# Altium footprint library SamacSys.PcbLib: 1008 footprints (part 59 of 63)
Each footprint in its own frame and in the unit in brackets; x right, y up, seen from the top. Pads: shape width x height; smd on the part's side, far side on the other; paste and mask are expansions set on the pad; w line width, h text height; cw(c..) or ccw(c..) is an arc to the next point about the centre after c.
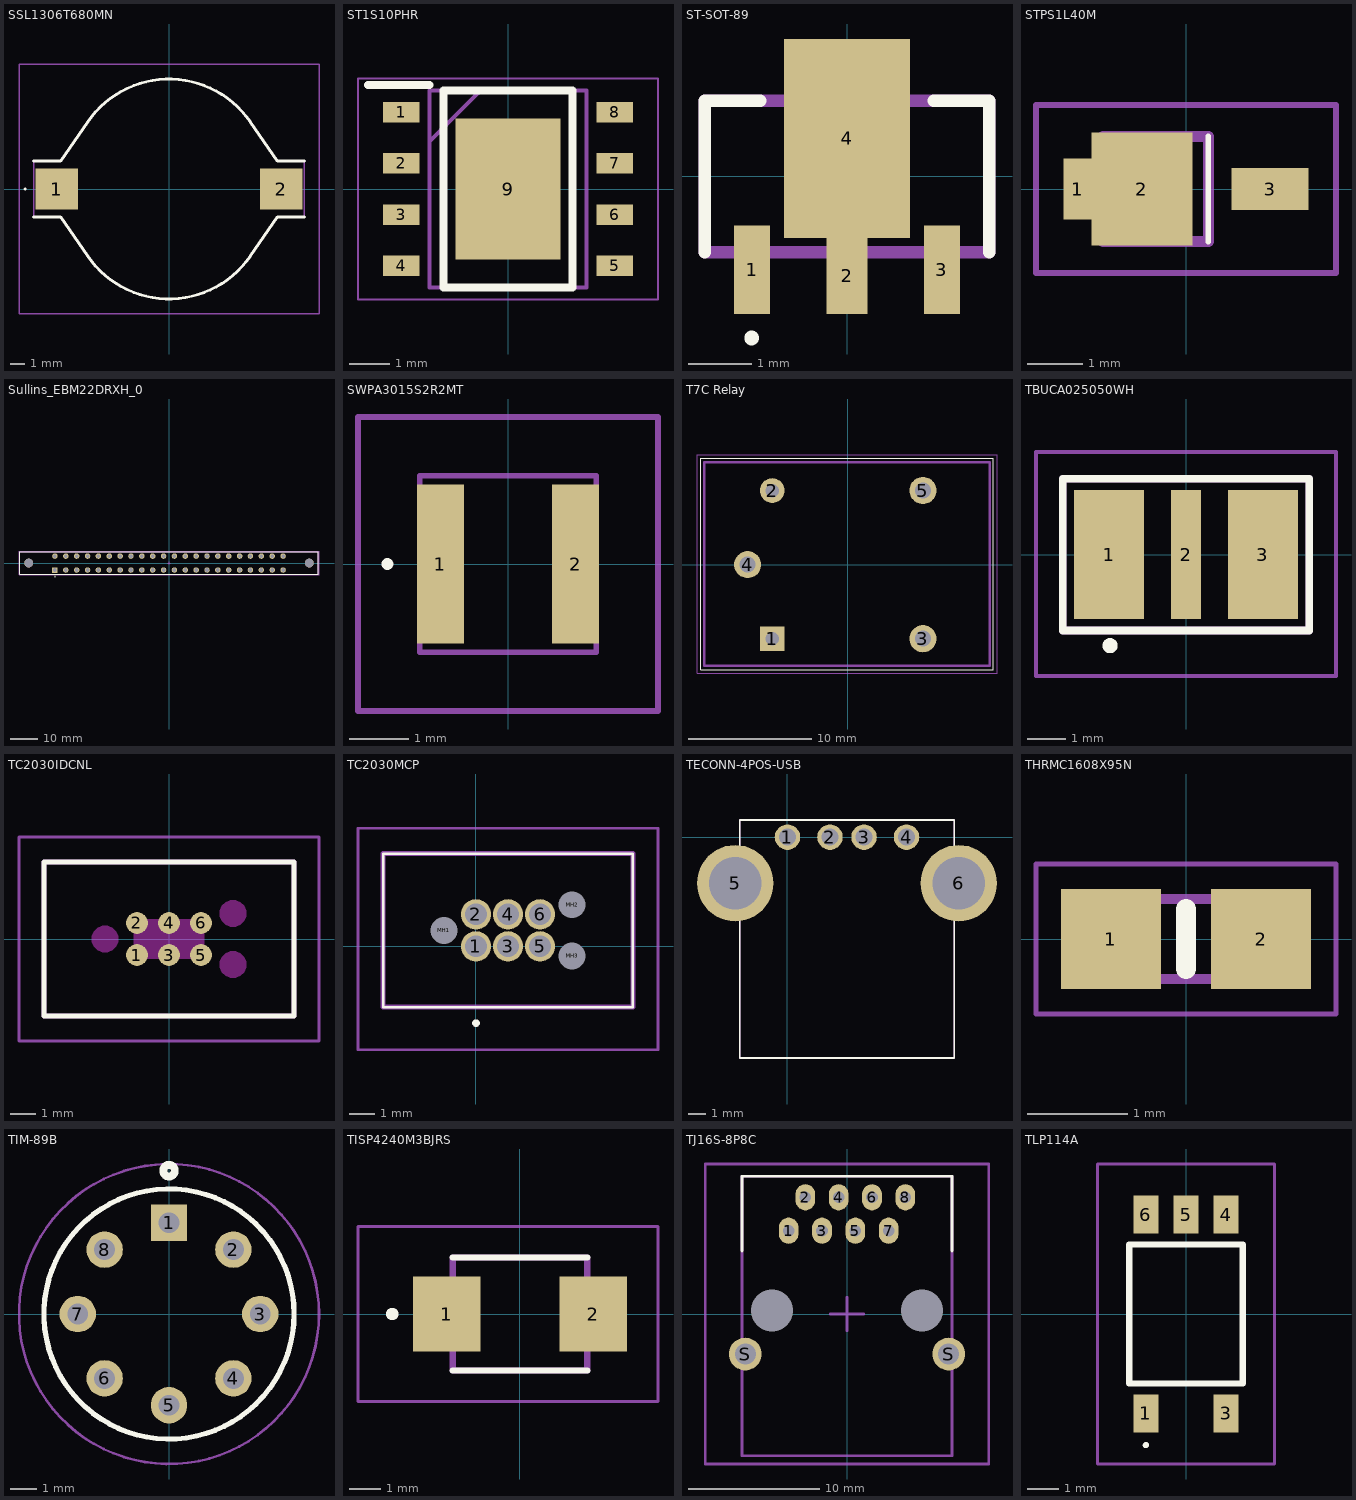
[diagram p58: the footprints below, top view; thin cyan lines are the x and y axes]

## SSL1306T680MN [mm]
pads (2):
  rect 2.92x2.79 smd: 1(-7.685,0) 2(7.685,0)
Top Overlay:
  lines w0.1: -9.9,0 cw(c-9.85,0) -9.8,0 cw(c-9.85,0) -9.9,0
  lines w0.2: -9.27,-1.905 -7.416,-1.905 -5.562,-4.6 ; -9.27,1.905 -7.416,1.905 -5.562,4.6 ; -5.564,-4.598 ccw(c0,-0.774) 5.557,-4.608 ; -5.564,4.598 cw(c0,0.774) 5.557,4.608 ; 5.562,-4.6 7.416,-1.905 9.27,-1.905 ; 5.562,4.6 7.416,1.905 9.27,1.905
Assembly:
  lines w0.1: -5.564,-4.598 ccw(c0,-0.774) 5.557,-4.608 ; -5.562,-4.6 -7.416,-1.905 -9.27,-1.905 -9.27,1.905 -7.416,1.905 -5.562,4.6 ; -5.557,4.608 cw(c0,0.774) 5.564,4.598 ; 5.562,-4.6 7.416,-1.905 9.27,-1.905 9.27,1.905 7.416,1.905 5.562,4.6
Countryard:
  lines w0.1: -10.27,-8.525 10.27,-8.525 10.27,8.525 -10.27,8.525 -10.27,-8.525
3D body "SSL1306T-680M-N.stp": height 0.1, standoff 0, extent -8.866,-1.116 8.866,1.116

## ST1S10PHR [mm]
pads (9):
  rect 0.9x0.51 smd: 1(-2.65,1.905) 2(-2.65,0.635) 3(-2.65,-0.635) 4(-2.65,-1.905) 5(2.65,-1.905) 6(2.65,-0.635) 7(2.65,0.635) 8(2.65,1.905)
  rect 2.6x3.5 smd: 9(0,0)
Top Overlay:
  lines w0.2: -3.475,2.58 -1.95,2.58 ; -1.6,-2.45 1.6,-2.45 1.6,2.45 -1.6,2.45 -1.6,-2.45
Assembly:
  lines w0.1: -1.95,1.18 -0.68,2.45 ; -1.95,-2.45 1.95,-2.45 1.95,2.45 -1.95,2.45 -1.95,-2.45
Countryard:
  lines w0.05: -3.725,-2.75 3.725,-2.75 3.725,2.75 -3.725,2.75 -3.725,-2.75
3D body "ST1S10PHR.stp": height 1.7, standoff -0.05, extent -3.099,-2.502 3.099,2.502

## ST-SOT-89 [mm]
pads (4):
  rect 0.57x1.4 smd: 1(-1.5,-1.475) 3(1.5,-1.475)
  rect 0.65x1.2 smd: 2(0,-1.575)
  rect 2x3.15 smd: 4(0,0.6)
Top Overlay:
  circle w0.2: c-1.51,-2.558 r0.016
  lines w0.2: -2.25,-1.2 -2.25,1.2 -1.373,1.2 ; 1.373,1.2 2.25,1.2 2.25,-1.2
Assembly:
  lines w0.2: -2.25,-1.2 -2.25,1.2 2.25,1.2 2.25,-1.2 -2.25,-1.2
3D body "L78L12ABUTR.stp": height 1.5, standoff 0, extent -2.25,-2.18 2.25,1.92

## STPS1L40M [mm]
pads (3):
  rect 0.5x1.1 smd: 1(-1.955,0)
  rect 1.82x2.03 smd: 2(-0.795,0)
  rect 1.38x0.75 smd: 3(1.515,0)
Top Overlay:
  lines w0.1: 0.405,-0.95 0.405,0.95
Assembly:
  lines w0.2: -1.495,-0.95 -1.495,0.95 0.405,0.95 0.405,-0.95 -1.495,-0.95
Countryard:
  lines w0.1: -2.705,-1.515 -2.705,1.515 2.705,1.515 2.705,-1.515 -2.705,-1.515

## Sullins_EBM22DRXH_0 [mm]
pads (46):
  rect 2x2 hole 1.3 paste-2539.97 mask+0: 1(-41.58,-2.54)
  round 2 hole 1.3 paste-2539.97 mask+0: 2(-37.62,-2.54) 3(-33.66,-2.54) 4(-29.7,-2.54) 5(-25.74,-2.54) 6(-21.78,-2.54) 7(-17.82,-2.54) 8(-13.86,-2.54) 9(-9.9,-2.54) 10(-5.94,-2.54) 11(-1.98,-2.54) 12(1.98,-2.54) 13(5.94,-2.54) 14(9.9,-2.54) 15(13.86,-2.54) 16(17.82,-2.54) 17(21.78,-2.54) 18(25.74,-2.54) 19(29.7,-2.54) 20(33.66,-2.54) 21(37.62,-2.54) 22(41.58,-2.54) A(-41.58,2.54) B(-37.62,2.54) C(-33.66,2.54) D(-29.7,2.54) E(-25.74,2.54) F(-21.78,2.54) H(-17.82,2.54) J(-13.86,2.54) K(-9.9,2.54) L(-5.94,2.54) M(-1.98,2.54) N(1.98,2.54) P(5.94,2.54) R(9.9,2.54) S(13.86,2.54) T(17.82,2.54) U(21.78,2.54) V(25.74,2.54) W(29.7,2.54) X(33.66,2.54) Y(37.62,2.54) Z(41.58,2.54)
  round 3.18 hole 3.18 unplated paste-2539.97 mask+0: ""(-51.17,0) ""(51.17,0)
Top Overlay:
  circle w0.25: c-41.58,-4.865 r0.125
  lines w0.2: -54.33,-4.13 54.33,-4.13 54.33,4.13 -54.33,4.13 -54.33,-4.13
Mechanical 10:
  lines w0.2: -54.685,-4.295 54.685,-4.295 54.685,4.295 -54.685,4.295 -54.685,-4.295
  text ".Designator" at 0,0 h1
Mechanical 12:
  lines w0.15: -54.33,-4.13 54.33,-4.13 54.33,4.13 -54.33,4.13 -54.33,-4.13
Countryard:
  lines w0.1: -0.5,0 0.5,0 ; 0,-0.5 0,0.5
  lines w0.2: -54.685,-4.295 54.685,-4.295 54.685,4.295 -54.685,4.295 -54.685,-4.295
3D body "User Library-EDGE conector Sullins _ _ M22DRXH.step": height 11.13, standoff -3.29, extent -54.261,-4.228 54.4,4.028

## SWPA3015S2R2MT [mm]
pads (2):
  rect 0.8x2.7 smd: 1(-1.15,0) 2(1.15,0)
Top Overlay:
  lines w0.1: -2.1,0 cw(c-2.05,0) -2,0 cw(c-2.05,0) -2.1,0
Assembly:
  lines w0.1: -1.5,-1.5 -1.5,1.5 1.5,1.5 1.5,-1.5 -1.5,-1.5
Countryard:
  lines w0.1: -2.55,-2.5 -2.55,2.5 2.55,2.5 2.55,-2.5 -2.55,-2.5
3D body "SWPA3015S2R2MT.stp": height 1.6, standoff 0, extent -1.5,-1.5 1.5,1.5

## T7C Relay [mm]
pads (5):
  rect 2x2 hole 1.1: 1(-6.1,-6)
  round 2 hole 1.1: 2(-6.1,6)
  round 2.2 hole 1.3: 3(6.1,-6) 4(-8.1,0) 5(6.1,6)
Top Overlay:
  lines w0.1: -11.9,-8.5 -11.9,8.6 11.8,8.6 11.8,-8.5 -11.9,-8.5
Assembly:
  lines w0.2: -11.6,-8.2 -11.6,8.3 11.5,8.3 11.5,-8.2 -11.6,-8.2
Countryard:
  lines w0.1: -12.2,-8.8 -12.2,8.9 12.1,8.9 12.1,-8.8 -12.2,-8.8
3D body "27E1064.stp": height 7.1, standoff -3.62, extent -11.5,-8.25 11.5,8.25

## TBUCA025050WH [mm]
pads (3):
  rect 1.85x3.4 smd: 1(-2.025,0) 3(2.025,0)
  rect 0.8x3.4 smd: 2(0,0)
Top Overlay:
  lines w0.2: -3.25,-2 -3.25,2 3.25,2 3.25,-2 -3.25,-2 ; -2,-2.5 cw(c-2,-2.4) -2,-2.3 cw(c-2,-2.4) -2,-2.5
Assembly:
  lines w0.2: -3.25,-2 -3.25,2 3.25,2 3.25,-2 -3.25,-2
Countryard:
  lines w0.1: -3.95,-3.2 -3.95,2.7 3.95,2.7 3.95,-3.2 -3.95,-3.2
3D body "TBU-CA065-200-WH.stp": height 0.88, standoff 0, extent -3.25,-2 3.25,2

## TC2030IDCNL [mm]
pads (6):
  round 0.863 smd paste-2: 1(-1.27,-0.635) 2(-1.27,0.635) 3(0,-0.635) 4(0,0.635) 5(1.27,-0.635) 6(1.27,0.635)
Top Overlay:
  lines w0.2: -4.953,-3.048 -4.953,3.048 4.953,3.048 4.953,-3.048 -4.953,-3.048
Keep-Out Layer:
  board cut-out: -2.54,-0.525 -2.644,-0.525 -2.837,-0.445 -2.985,-0.297 -3.065,-0.104 -3.065,0 -3.065,0.104 -2.985,0.297 -2.837,0.445 -2.644,0.525 -2.54,0.525 -2.436,0.525 -2.243,0.445 -2.095,0.297 -2.015,0.104 -2.015,0 -2.015,-0.104 -2.095,-0.297 -2.243,-0.445 -2.436,-0.525
  board cut-out: 2.54,-1.54 2.436,-1.54 2.243,-1.46 2.095,-1.312 2.015,-1.119 2.015,-1.015 2.015,-0.911 2.095,-0.718 2.243,-0.57 2.436,-0.49 2.54,-0.49 2.644,-0.49 2.837,-0.57 2.985,-0.718 3.065,-0.911 3.065,-1.015 3.065,-1.119 2.985,-1.312 2.837,-1.46 2.644,-1.54
  board cut-out: 2.54,0.49 2.436,0.49 2.243,0.57 2.095,0.718 2.015,0.911 2.015,1.015 2.015,1.119 2.095,1.312 2.243,1.46 2.436,1.54 2.54,1.54 2.644,1.54 2.837,1.46 2.985,1.312 3.065,1.119 3.065,1.015 3.065,0.911 2.985,0.718 2.837,0.57 2.644,0.49
Keep-Out Layer:
  rectangle: -1.4,-0.8 1.4,0.8
Assembly:
  lines w0.2: -4.953,-3.048 -4.953,3.048 4.953,3.048 4.953,-3.048 -4.953,-3.048
Countryard:
  lines w0.1: -5.953,-4.048 -5.953,4.048 5.953,4.048 5.953,-4.048 -5.953,-4.048
3D body "TC2030.stp": height 37.8, standoff -3.7, extent -4.8,-3 4.7,3

## TC2030MCP [mm]
pads (9):
  round 1.2 hole 0.863: 1(0,0) 2(0,1.27) 3(1.27,0) 4(1.27,1.27) 5(2.54,0) 6(2.54,1.27)
  round 0.533 hole 1.067 unplated: MH1(-1.27,0.635) MH2(3.81,1.651) MH3(3.81,-0.381)
Top Overlay:
  lines w0.1: -3.683,-2.413 -3.683,3.683 6.223,3.683 6.223,-2.413 -3.683,-2.413
  lines w0.2: 0,-3.1 cw(c0,-3.05) 0,-3 ; 0,-3.1 ccw(c0,-3.05) 0,-3 ; 0,-3.1 cw(c0,-3.05) 0,-3
Assembly:
  lines w0.2: -3.683,-2.413 -3.683,3.683 6.223,3.683 6.223,-2.413 -3.683,-2.413
Countryard:
  lines w0.1: -4.683,-4.1 -4.683,4.683 7.223,4.683 7.223,-4.1 -4.683,-4.1
3D body "TC2030-MCP.stp": height 18.77, standoff -5, extent -3.683,-2.413 6.223,3.683

## TECONN-4POS-USB [mm]
pads (6):
  round 1.5 hole 1: 1(0,0) 2(2.5,0) 3(4.5,0) 4(7,0)
  round 4.5 hole 3.1: 5(-3.07,-2.71) 6(10.07,-2.71)
Top Overlay:
  lines w0.1: -2.8,-12.99 9.8,-12.99 9.8,1.01 -2.8,1.01 -2.8,-12.99
Assembly:
  lines w0.1: -2.8,-12.99 9.8,-12.99 9.8,1.01 -2.8,1.01 -2.8,-12.99
3D body "292303-1.stp": height 7.72, standoff -3.64, extent -4.615,-12.99 11.617,1.01

## THRMC1608X95N [mm]
pads (2):
  rect 1x1 smd: 1(-0.75,0) 2(0.75,0)
Top Overlay:
  lines w0.2: 0,-0.3 0,0.3
Assembly:
  lines w0.1: -0.8,-0.4 -0.8,0.4 0.8,0.4 0.8,-0.4 -0.8,-0.4
Countryard:
  lines w0.05: -1.5,-0.75 -1.5,0.75 1.5,0.75 1.5,-0.75 -1.5,-0.75
3D body "NCP18XH103F03RB.stp": height 0.95, standoff 0, extent -0.8,-0.4 0.8,0.4

## TIM-89B [mm]
pads (8):
  rect 1.4x1.4 hole 0.8: 1(0,3.5)
  round 1.4 hole 0.8: 2(2.47,2.47) 3(3.5,0) 4(2.47,-2.47) 5(0,-3.5) 6(-2.47,-2.47) 7(-3.5,0) 8(-2.47,2.47)
Top Overlay:
  circle w0.2: c0,0 r4.8
  circle w0.3: c0,5.5 r0.224
Countryard:
  circle w0.1: c0,0 r5.755

## TISP4240M3BJRS [mm]
pads (2):
  rect 2.16x2.4 smd: 1(-2.35,0) 2(2.35,0)
Top Overlay:
  lines w0.2: -2.158,-1.81 2.158,-1.81 ; -2.158,1.81 2.158,1.81 ; -4.2,0 cw(c-4.1,0) -4,0 cw(c-4.1,0) -4.2,0
Assembly:
  lines w0.2: -2.158,-1.81 2.158,-1.81 2.158,1.81 -2.158,1.81 -2.158,-1.81
Countryard:
  lines w0.1: -5.2,-2.81 4.43,-2.81 4.43,2.81 -5.2,2.81 -5.2,-2.81
3D body "TISP4240M3BJR-S.stp": height 2.5, standoff 0, extent -3.214,-1.81 3.214,1.81

## TJ16S-8P8C [mm]
height 13.55
pads (12):
  oval 1.5x2 hole 0.9: 1(-4.445,6.35) 2(-3.175,8.89) 3(-1.905,6.35) 4(-0.635,8.89) 5(0.635,6.35) 6(1.905,8.89) 7(3.175,6.35) 8(4.445,8.89)
  round 0 hole 3.2 unplated: M(-5.715,0.25) M(5.715,0.25)
  round 2.5 hole 1.6: S(-7.75,-3.05) S(7.75,-3.05)
Top Overlay:
  lines w0.2: -8,4.8 -8,10.5 0,10.5 8,10.5 8,4.8
3D Body:
  lines w0.2: -8,-10.8 -8,10.5 8,10.5 8,-10.8 -8,-10.8
Top Assembly:
  lines w0.1: -8,10.5 8,10.5 ; -8,10.5 -8,-10.75 8,-10.75 8,10.5 ; -8,10.5 8,10.5
Countryard:
  lines w0.2: -1.27,0 1.27,0 ; 0,-1.27 0,1.27 ; -10.795,-11.43 -10.795,11.43 10.795,11.43 10.795,-11.43 -10.795,-11.43
3D body "Abracon ARJC02-111008B.STEP": height 16.07, standoff -3.7, extent -10.336,-10.851 10.336,10.25

## TLP114A [mm]
pads (5):
  rect 0.8x1.2 smd: 1(-1.27,-3.15) 3(1.27,-3.15) 4(1.27,3.15) 5(0,3.15) 6(-1.27,3.15)
Top Overlay:
  lines w0.1: -1.27,-4.2 ccw(c-1.27,-4.15) -1.27,-4.1 ccw(c-1.27,-4.15) -1.27,-4.2
  lines w0.2: -1.8,-2.2 -1.8,2.2 1.8,2.2 1.8,-2.2 -1.8,-2.2
Assembly:
  lines w0.1: -1.8,-2.2 -1.8,2.2 1.8,2.2 1.8,-2.2 -1.8,-2.2
Countryard:
  lines w0.1: -2.8,-4.75 -2.8,4.75 2.8,4.75 2.8,-4.75 -2.8,-4.75